# Altium schematic symbol library 5-1814832-1.SchLib: 1 symbol
Pins are listed as number, name and electrical type; pins without a type are passive.

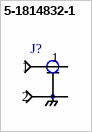
[diagram p0: symbol 5-1814832-1]

## 5-1814832-1
designator J?  (value not drawn)
SMA 50 O Female Straight PCB Socket Threaded RF Jack Connector; Number_of_Positions: 1; MF: TE Connectivity; EU_RoHS_Compliance: Compliant with Exemptions; TE_purchase_URL: https://www.te.com/usa-en/product-5-1814832-1.html?te_bu=Cor&te_type=disp&te_campaign=seda_glo_cor-seda-global-disp-prtnr-fy19-seda-model-bom-cta_sma-317_1&elqCampaignId=32493; SnapEDA_Link: https://www.snapeda.com/parts/5-1814832-1/TE%20Connectivity%20AMP%20Connectors/view-part/?ref=snap; Digi-Key_Purchase_URL: https://www.digikey.com.tr/product-detail/en/te-connectivity-amp-connectors/5-1814832-1/A97594-ND/1755982?utm_source=snapeda&utm_medium=aggregator&utm_campaign=symbol; Digi-Key_Part_Number: A97594-ND; Package: None; MP: 5-1814832-1; Value: *
footprint *TE_5-1814832-1
pins: 1, 2, 3 2, 4 2, 5 2